# Altium footprint library Capacitors.PcbLib: 96 footprints (part 5 of 6)
Each footprint in its own frame and in the unit in brackets; x right, y up, seen from the top. Pads: shape width x height; smd on the part's side, far side on the other; paste and mask are expansions set on the pad; w line width, h text height; cw(c..) or ccw(c..) is an arc to the next point about the centre after c.
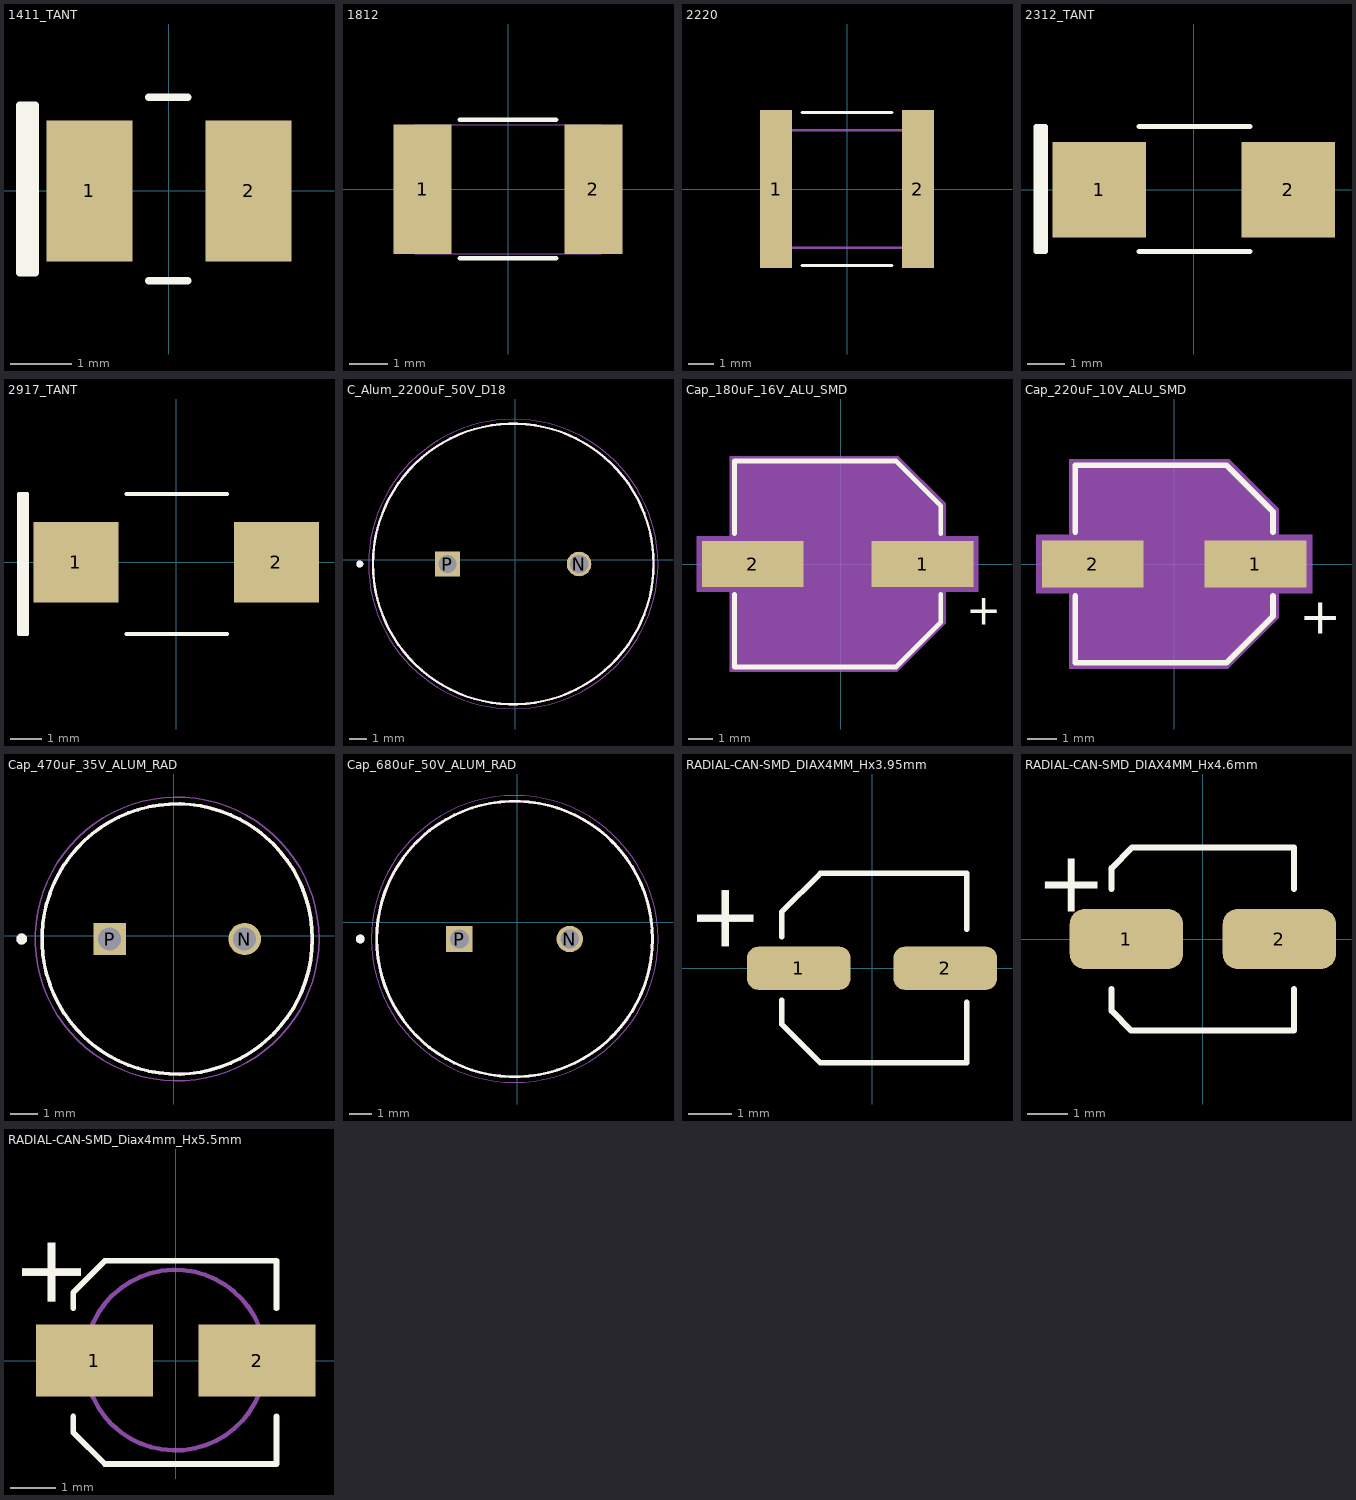
[diagram p4: the footprints below, top view; thin cyan lines are the x and y axes]

## 1411_TANT [mm] "20220701 / E.Naranjo"
pads (2):
  rect 1.405x2.3 smd: 1(-1.3,0) 2(1.3,0)
Top Overlay:
  lines w0.127: -2.31,-1.339 -2.31,1.393 ; -0.332,-1.469 0.303,-1.469 ; -0.332,1.529 0.303,1.529 ; -2.437,-1.339 -2.183,-1.339 -2.183,1.393 -2.437,1.393 -2.437,-1.339
3D body "CTSM_TCM2NK_3528_L3.7W3H2.1T0.13S0.8F2.3A1.9B0.55E2.2G1.8P0.5R1X0.2.step": height 2.12, standoff 0.01, extent -1.836,-1.471 1.864,1.529

## 1812 [mm] "/20220517/F-A.Ospina"
pads (2):
  rect 1.52x3.4 smd paste+0: 1(-2.248,0) 2(2.248,0)
Top Overlay:
  lines w0.127: -1.272,1.829 1.267,1.829 ; -1.27,-1.817 1.27,-1.817
Mechanical 13:
  lines w0.025: -2.451,-1.702 -2.451,1.702 ; -2.451,-1.702 -1.689,-1.702 -1.689,1.702 -2.451,1.702 ; -2.451,-1.702 -2.451,1.702 ; -2.451,-1.702 2.451,-1.702 ; -2.451,1.702 2.451,1.702 ; 2.451,-1.702 1.689,-1.702 1.689,1.702 2.451,1.702 ; 2.451,-1.702 2.451,1.702 ; 2.451,-1.702 2.451,1.702
3D body "CAP_CC1812_YAG.step": height 3.4, standoff 0, extent -2.451,-1.702 2.451,1.702

## 2220 [mm] "5750 Metric / 20190221 / C-A.Serna.A"
height 2.5
pads (2):
  rect 1.25x6.2 smd: 1(-2.775,0) 2(2.775,0)
Top Overlay:
  lines w0.127: -1.75,-3 1.75,-3 ; -1.75,3 1.75,3
Mechanical 1:
  lines w0.1: -3.05,-2.3 3.05,-2.3 3.05,2.3 -3.05,2.3 -3.05,-2.3
3D body: height 2.5, standoff 0, extent -3.05,-2.3 -2.7,2.3
3D body: height 2.5, standoff 0, extent -2.7,-2.3 2.7,2.3
3D body: height 2.5, standoff 0, extent 2.7,-2.3 3.05,2.3

## 2312_TANT [mm] "6032 Metric / 20230427 / J.Jaramillo"
pads (2):
  rect 2.5x2.55 smd: 1(-2.525,0) 2(2.525,0)
Top Overlay:
  lines w0.127: -4.089,-1.655 -4.089,1.69 ; -1.465,-1.655 1.505,-1.655 ; -1.465,1.69 1.505,1.69 ; -4.216,-1.655 -4.216,1.69 -3.962,1.69 -3.962,-1.655 -4.216,-1.655
3D body "2312.step": height 2.7, standoff 0, extent -3.085,-1.655 3.015,1.695

## 2917_TANT [mm] "7343 Metric / 20230427/ J.Jaramillo"
pads (2):
  rect 2.7x2.55 smd: 1(-3.175,0) 2(3.175,0)
Top Overlay:
  lines w0.127: -4.851,-2.285 -4.851,2.165 ; -1.58,-2.285 1.61,-2.285 ; -1.58,2.165 1.61,2.165 ; -4.978,-2.285 -4.978,2.165 -4.724,2.165 -4.724,-2.285 -4.978,-2.285
3D body "2917-3d.step": height 4.2, standoff 0, extent -3.685,-2.285 3.715,2.165

## C_Alum_2200uF_50V_D18 [mm]
pads (2):
  round 1.4 hole 1.05: N(3.623,-0.254)
  rect 1.4x1.4 hole 1.05: P(-3.877,-0.254)
Top Overlay:
  circle w0.2: c-8.877,-0.254 r0.1
  circle w0.127: c-0.127,-0.254 r8
Mechanical 13:
  circle w0.2: c-8.877,-0.254 r0.1
  circle w0.127: c-0.127,-0.254 r8
Mechanical 15:
  circle w0.05: c-0.127,-0.254 r8.25
3D body "step_temp.STEP": height 31.5, standoff -17, extent -8.127,-8.253 7.873,7.745

## Cap_180uF_16V_ALU_SMD [mm] "20/11/2026"
pads (2):
  rect 4.2x1.9 smd paste+0 mask+0.102: 1(3.373,0) 2(-3.627,0)
Top Overlay:
  lines w0.2: -4.377,-1.25 -4.377,-4.25 2.273,-4.25 4.123,-2.4 4.123,-1.25 ; -4.377,1.25 -4.377,4.25 2.273,4.25 4.123,2.4 4.123,1.25
  text "+" at 5.173,-2.5 h1.27
Mechanical 13:
  circle w0.1: c-0.127,0 r4
  lines w0.1: -4.277,-4.15 -4.277,4.15 2.223,4.15 4.023,2.35 4.023,-2.35 2.223,-4.15 -4.277,-4.15
  text "+" at 5.173,-2.5 h1.27
Mechanical 15:
  region: 4.323,2.5 4.323,1.15 5.673,1.15 5.673,-1.15 4.323,-1.15 4.323,-2.45 2.323,-4.45 -4.577,-4.45 -4.577,-1.15 -5.927,-1.15 -5.927,1.15 -4.577,1.15 -4.577,4.45 2.373,4.45
3D body "A765KH187M1CLAE016.step": height 7.6, standoff -0.2, extent -4.499,-4.287 4.701,4.213

## Cap_220uF_10V_ALU_SMD [mm] "20/11/2026"
pads (2):
  rect 3.5x1.6 smd: 1(2.8,0) 2(-2.8,0)
Top Overlay:
  lines w0.2: -3.4,-1.1 -3.4,-3.4 1.8,-3.4 3.4,-1.8 3.4,-1.1 ; -3.4,1.1 -3.4,3.4 1.8,3.4 3.4,1.8 3.4,1.1
  text "+" at 4.3,-2.4 h1.27
Mechanical 13:
  circle w0.1: c0,0 r3.15
  lines w0.1: -3.3,-3.3 -3.3,3.3 1.75,3.3 3.3,1.75 3.3,-1.75 1.75,-3.3 -3.3,-3.3
  text "+" at 4.3,-2.4 h1.27
Mechanical 15:
  region: 3.6,1.9 3.6,1 4.75,1 4.75,-1 3.6,-1 3.6,-1.85 1.85,-3.6 -3.6,-3.6 -3.6,-1 -4.75,-1 -4.75,1 -3.6,1 -3.6,3.6 1.9,3.6
3D body "Download_STP_875105x440xx+(rev1).stp": height 5.65, standoff -0.15, extent -3.65,-3.3 3.65,3.3

## Cap_470uF_35V_ALUM_RAD [mm]
pads (2):
  round 1.2 hole 0.85: N(2.627,-0.127)
  rect 1.2x1.2 hole 0.85: P(-2.373,-0.127)
Top Overlay:
  circle w0.127: c0.127,-0.127 r5
  circle w0.2: c-5.623,-0.127 r0.1
Mechanical 13:
  circle w0.127: c0.127,-0.127 r5
  circle w0.2: c-5.623,-0.127 r0.1
Mechanical 15:
  circle w0.05: c0.127,-0.127 r5.25
3D body "step_temp.STEP": height 16, standoff -17, extent -4.858,-5.117 5.127,4.863

## Cap_680uF_50V_ALUM_RAD [mm]
pads (2):
  round 1.2 hole 0.85: N(2.373,-0.762)
  rect 1.2x1.2 hole 0.85: P(-2.627,-0.762)
Top Overlay:
  circle w0.127: c-0.127,-0.762 r6.25
  circle w0.2: c-7.127,-0.762 r0.1
Mechanical 13:
  circle w0.127: c-0.127,-0.762 r6.25
  circle w0.2: c-7.127,-0.762 r0.1
Mechanical 15:
  circle w0.05: c-0.127,-0.762 r6.5
3D body "step_temp.STEP": height 30, standoff -17, extent -6.377,-7.012 6.123,5.488

## PCBComponent_1 [mm]

## PCBComponent_1 - duplicate [mm]

## PCBComponent_1 - duplicate1 [mm]

## RADIAL-CAN-SMD_DIAX4MM_Hx3.95mm [mm] "/20200715/N-A.Potosi"
pads (2):
  rrect50% 2.4x1 smd: 1(-1.7,0) 2(1.7,0)
Top Overlay:
  lines w0.127: -2.1,-0.738 -2.1,-1.3 -1.2,-2.2 2.2,-2.2 2.2,-0.786 ; -2.1,0.727 -2.1,1.3 -1.2,2.2 2.2,2.2 2.2,0.904
  text "+" at -4.064,2.032 h1.52
3D body "PCAP_4x3-ELECT_NCA.step": height 3.25, standoff 0, extent -2.502,-2.248 2.502,2.248

## RADIAL-CAN-SMD_DIAX4MM_Hx4.6mm [mm] "/20200416V-A.Patino"
pads (2):
  rrect50% 2.819x1.5 smd: 1(-1.905,0) 2(1.905,0)
Top Overlay:
  lines w0.152: -2.273,-1.247 -2.273,-1.791 -1.791,-2.273 2.273,-2.273 2.273,-1.247 ; -2.273,1.247 -2.273,1.765 -1.765,2.273 2.273,2.273 2.273,1.247
  text "+" at -4.153,0.675 h1.52
3D body "CAP_UZP_4X4P5-M.step": height 4.65, standoff 0, extent -2.541,-2.159 2.667,2.133

## RADIAL-CAN-SMD_Diax4mm_Hx5.5mm [mm] "20191118 / J-P.Vargas.A"
pads (2):
  rect 2.6x1.6 smd: 1(-1.8,0) 2(1.8,0)
Top Overlay:
  lines w0.127: -2.27,-1.24 -2.27,-1.59 -1.57,-2.29 2.23,-2.29 2.23,-1.24 ; -2.27,1.16 -2.27,1.51 -1.57,2.21 2.23,2.21 2.23,1.16
  text "+" at -3.4,2.83 h1.52
Mechanical 1:
  circle w0.1: c-0.01,0.01 r2
3D body "865090640005.step": height 5.21, standoff -0.29, extent -2.503,-2.15 2.504,2.15